# Altium schematic symbol library Dynamixel_hex_pcb.SchLib: 5 symbols
Pins are listed as number, name and electrical type; pins without a type are passive.

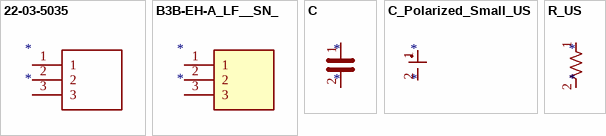
[diagram p0: symbols 22-03-5035 to R_US]

## 22-03-5035
designator *
pins: 1, 2, 3

## B3B-EH-A_LF__SN_
designator *
pins: 1, 2, 3

## C
designator *
pins: 1, 2

## C_Polarized_Small_US
designator *
pins: 1, 2

## R_US
designator *
pins: 1, 2